# Altium schematic symbol library MY_LIB_Connectors.SchLib: 177 symbols (part 1 of 4)
Pins are listed as number, name and electrical type; pins without a type are passive.

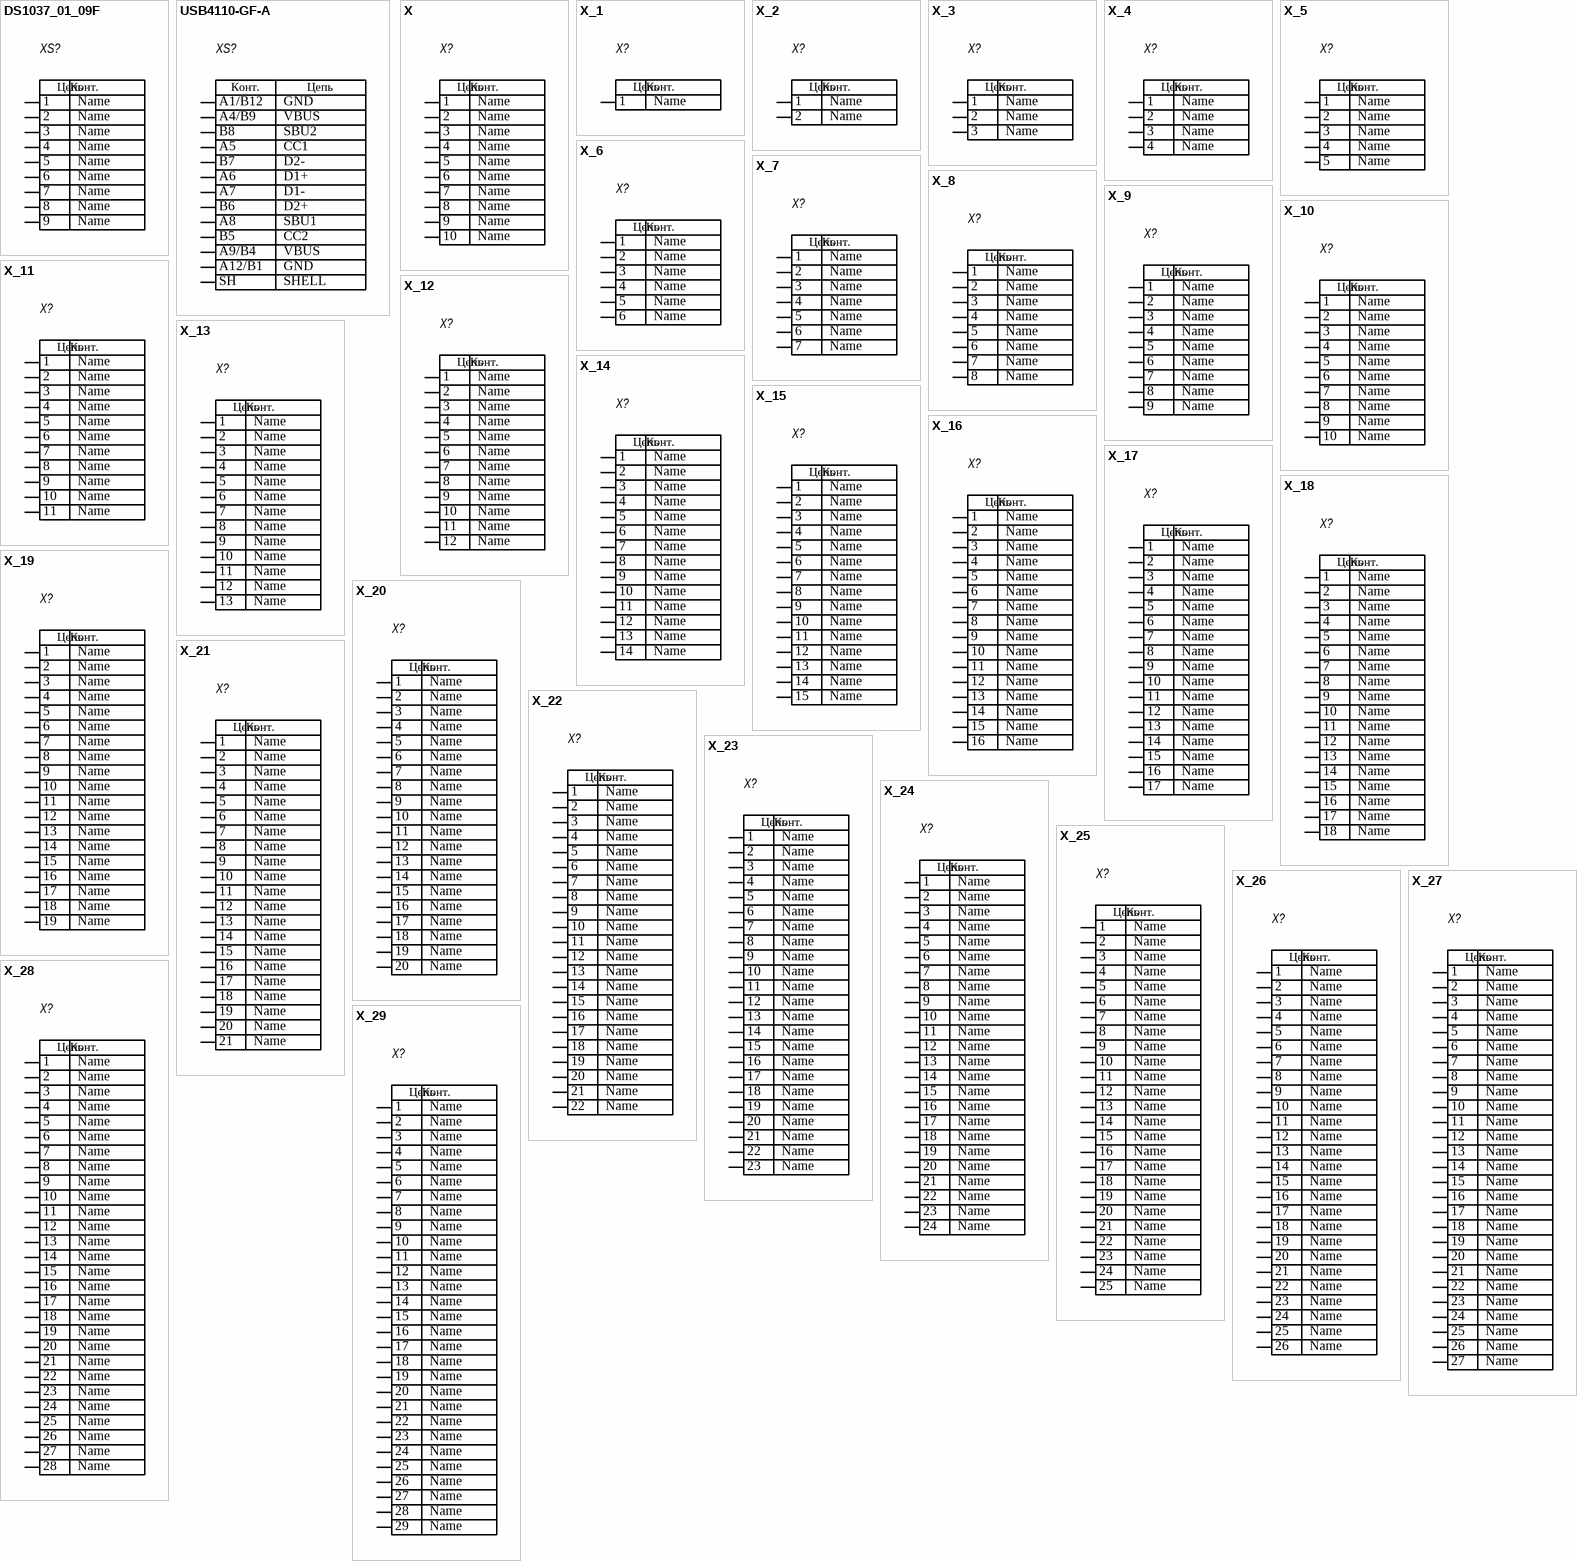
[diagram p0: symbols DS1037_01_09F to X_29]

## DS1037_01_09F
designator XS?  Pin9_Name: Name  (hidden comment: *)
Generic 9-contact connector; DBUR table style; editable signal names; Value: *; Pin8_Name: Name; Pin7_Name: Name; Pin6_Name: Name; Pin5_Name: Name; Pin4_Name: Name; Pin3_Name: Name; Pin2_Name: Name; Pin1_Name: Name
pins: 1 Name, 2 Name, 3 Name, 4 Name, 5 Name, 6 Name, 7 Name, 8 Name, 9 Name
1 alternate drawing of the same symbol
text: Конт.; Цепь

## USB4110-GF-A
designator XS?  PinA1_B12_Name: GND  PinA4_B9_Name: VBUS  PinB8_Name: SBU2  PinA5_Name: CC1  PinB7_Name: D2-  PinA6_Name: D1+  PinA7_Name: D1-  PinB6_Name: D2+  PinA8_Name: SBU1  PinB5_Name: CC2  PinSH_Name: SHELL  (hidden comment: USB4110-GF-A)
GCT USB Type-C USB2.0 receptacle; 12 PCB signal terminals representing 16 mating contacts; common SH shell pin; Value: USB4110-GF-A; Manufacturer: GCT; MPN: USB4110-GF-A; Datasheet: https://gct.co/files/drawings/usb4110.pdf; PinA9_B4_Name: VBUS; PinA12_B1_Name: GND
pins: A1/B12 GND, A4/B9 VBUS, A5 CC1, A6 D+1, A7 D-1, A8 SBU1, A9/B4 VBUS, A12/B1 GND, B5 CC2, B6 D+2, B7 D-2, B8 SBU2, SH SHELL
text: Конт.; Цепь

## X
designator X?  Pin10_Name: Name  (hidden comment: *)
Generic 10-contact connector; DBUR table style; editable signal names; Value: *; Pin9_Name: Name; Pin8_Name: Name; Pin7_Name: Name; Pin6_Name: Name; Pin5_Name: Name; Pin4_Name: Name; Pin3_Name: Name; Pin2_Name: Name; Pin1_Name: Name
pins: 1 Name, 2 Name, 3 Name, 4 Name, 5 Name, 6 Name, 7 Name, 8 Name, 9 Name, 10 Name
1 alternate drawing of the same symbol
text: Конт.; Цепь

## X_1
designator X?  Pin1_Name: Name  (hidden comment: *)
Generic 1-contact connector; DBUR table style; editable signal names; Value: *
pins: 1 Name
1 alternate drawing of the same symbol
text: Конт.; Цепь

## X_2
designator X?  Pin2_Name: Name  (hidden comment: *)
Generic 2-contact connector; DBUR table style; editable signal names; Value: *; Pin1_Name: Name
pins: 1 Name, 2 Name
1 alternate drawing of the same symbol
text: Конт.; Цепь

## X_3
designator X?  Pin3_Name: Name  (hidden comment: *)
Generic 3-contact connector; DBUR table style; editable signal names; Value: *; Pin2_Name: Name; Pin1_Name: Name
pins: 1 Name, 2 Name, 3 Name
1 alternate drawing of the same symbol
text: Конт.; Цепь

## X_4
designator X?  Pin4_Name: Name  (hidden comment: *)
Generic 4-contact connector; DBUR table style; editable signal names; Value: *; Pin3_Name: Name; Pin2_Name: Name; Pin1_Name: Name
pins: 1 Name, 2 Name, 3 Name, 4 Name
1 alternate drawing of the same symbol
text: Конт.; Цепь

## X_5
designator X?  Pin5_Name: Name  (hidden comment: *)
Generic 5-contact connector; DBUR table style; editable signal names; Value: *; Pin4_Name: Name; Pin3_Name: Name; Pin2_Name: Name; Pin1_Name: Name
pins: 1 Name, 2 Name, 3 Name, 4 Name, 5 Name
1 alternate drawing of the same symbol
text: Конт.; Цепь

## X_6
designator X?  Pin6_Name: Name  (hidden comment: *)
Generic 6-contact connector; DBUR table style; editable signal names; Value: *; Pin5_Name: Name; Pin4_Name: Name; Pin3_Name: Name; Pin2_Name: Name; Pin1_Name: Name
pins: 1 Name, 2 Name, 3 Name, 4 Name, 5 Name, 6 Name
1 alternate drawing of the same symbol
text: Конт.; Цепь

## X_7
designator X?  Pin7_Name: Name  (hidden comment: *)
Generic 7-contact connector; DBUR table style; editable signal names; Value: *; Pin6_Name: Name; Pin5_Name: Name; Pin4_Name: Name; Pin3_Name: Name; Pin2_Name: Name; Pin1_Name: Name
pins: 1 Name, 2 Name, 3 Name, 4 Name, 5 Name, 6 Name, 7 Name
1 alternate drawing of the same symbol
text: Конт.; Цепь

## X_8
designator X?  Pin8_Name: Name  (hidden comment: *)
Generic 8-contact connector; DBUR table style; editable signal names; Value: *; Pin7_Name: Name; Pin6_Name: Name; Pin5_Name: Name; Pin4_Name: Name; Pin3_Name: Name; Pin2_Name: Name; Pin1_Name: Name
pins: 1 Name, 2 Name, 3 Name, 4 Name, 5 Name, 6 Name, 7 Name, 8 Name
1 alternate drawing of the same symbol
text: Конт.; Цепь

## X_9
designator X?  Pin9_Name: Name  (hidden comment: *)
Generic 9-contact connector; DBUR table style; editable signal names; Value: *; Pin8_Name: Name; Pin7_Name: Name; Pin6_Name: Name; Pin5_Name: Name; Pin4_Name: Name; Pin3_Name: Name; Pin2_Name: Name; Pin1_Name: Name
pins: 1 Name, 2 Name, 3 Name, 4 Name, 5 Name, 6 Name, 7 Name, 8 Name, 9 Name
1 alternate drawing of the same symbol
text: Конт.; Цепь

## X_10
designator X?  Pin10_Name: Name  (hidden comment: *)
Generic 10-contact connector; DBUR table style; editable signal names; Value: *; Pin9_Name: Name; Pin8_Name: Name; Pin7_Name: Name; Pin6_Name: Name; Pin5_Name: Name; Pin4_Name: Name; Pin3_Name: Name; Pin2_Name: Name; Pin1_Name: Name
pins: 1 Name, 2 Name, 3 Name, 4 Name, 5 Name, 6 Name, 7 Name, 8 Name, 9 Name, 10 Name
1 alternate drawing of the same symbol
text: Конт.; Цепь

## X_11
designator X?  Pin11_Name: Name  (hidden comment: *)
Generic 11-contact connector; DBUR table style; editable signal names; Value: *; Pin10_Name: Name; Pin9_Name: Name; Pin8_Name: Name; Pin7_Name: Name; Pin6_Name: Name; Pin5_Name: Name; Pin4_Name: Name; Pin3_Name: Name; Pin2_Name: Name; Pin1_Name: Name
pins: 1 Name, 2 Name, 3 Name, 4 Name, 5 Name, 6 Name, 7 Name, 8 Name, 9 Name, 10 Name, 11 Name
1 alternate drawing of the same symbol
text: Конт.; Цепь

## X_12
designator X?  Pin12_Name: Name  (hidden comment: *)
Generic 12-contact connector; DBUR table style; editable signal names; Value: *; Pin11_Name: Name; Pin10_Name: Name; Pin9_Name: Name; Pin8_Name: Name; Pin7_Name: Name; Pin6_Name: Name; Pin5_Name: Name; Pin4_Name: Name; Pin3_Name: Name; Pin2_Name: Name; Pin1_Name: Name
pins: 1 Name, 2 Name, 3 Name, 4 Name, 5 Name, 6 Name, 7 Name, 8 Name, 9 Name, 10 Name, 11 Name, 12 Name
1 alternate drawing of the same symbol
text: Конт.; Цепь

## X_13
designator X?  Pin13_Name: Name  (hidden comment: *)
Generic 13-contact connector; DBUR table style; editable signal names; Value: *; Pin12_Name: Name; Pin11_Name: Name; Pin10_Name: Name; Pin9_Name: Name; Pin8_Name: Name; Pin7_Name: Name; Pin6_Name: Name; Pin5_Name: Name; Pin4_Name: Name; Pin3_Name: Name; Pin2_Name: Name; Pin1_Name: Name
pins: 1 Name, 2 Name, 3 Name, 4 Name, 5 Name, 6 Name, 7 Name, 8 Name, 9 Name, 10 Name, 11 Name, 12 Name, 13 Name
1 alternate drawing of the same symbol
text: Конт.; Цепь

## X_14
designator X?  Pin14_Name: Name  (hidden comment: *)
Generic 14-contact connector; DBUR table style; editable signal names; Value: *; Pin13_Name: Name; Pin12_Name: Name; Pin11_Name: Name; Pin10_Name: Name; Pin9_Name: Name; Pin8_Name: Name; Pin7_Name: Name; Pin6_Name: Name; Pin5_Name: Name; Pin4_Name: Name; Pin3_Name: Name; Pin2_Name: Name; Pin1_Name: Name
pins: 1 Name, 2 Name, 3 Name, 4 Name, 5 Name, 6 Name, 7 Name, 8 Name, 9 Name, 10 Name, 11 Name, 12 Name, 13 Name, 14 Name
1 alternate drawing of the same symbol
text: Конт.; Цепь

## X_15
designator X?  Pin15_Name: Name  (hidden comment: *)
Generic 15-contact connector; DBUR table style; editable signal names; Value: *; Pin14_Name: Name; Pin13_Name: Name; Pin12_Name: Name; Pin11_Name: Name; Pin10_Name: Name; Pin9_Name: Name; Pin8_Name: Name; Pin7_Name: Name; Pin6_Name: Name; Pin5_Name: Name; Pin4_Name: Name; Pin3_Name: Name; Pin2_Name: Name; Pin1_Name: Name
pins: 1 Name, 2 Name, 3 Name, 4 Name, 5 Name, 6 Name, 7 Name, 8 Name, 9 Name, 10 Name, 11 Name, 12 Name, 13 Name, 14 Name, 15 Name
1 alternate drawing of the same symbol
text: Конт.; Цепь

## X_16
designator X?  Pin16_Name: Name  (hidden comment: *)
Generic 16-contact connector; DBUR table style; editable signal names; Value: *; Pin15_Name: Name; Pin14_Name: Name; Pin13_Name: Name; Pin12_Name: Name; Pin11_Name: Name; Pin10_Name: Name; Pin9_Name: Name; Pin8_Name: Name; Pin7_Name: Name; Pin6_Name: Name; Pin5_Name: Name; Pin4_Name: Name; Pin3_Name: Name; Pin2_Name: Name; Pin1_Name: Name
pins: 1 Name, 2 Name, 3 Name, 4 Name, 5 Name, 6 Name, 7 Name, 8 Name, 9 Name, 10 Name, 11 Name, 12 Name, 13 Name, 14 Name, 15 Name, 16 Name
1 alternate drawing of the same symbol
text: Конт.; Цепь

## X_17
designator X?  Pin17_Name: Name  (hidden comment: *)
Generic 17-contact connector; DBUR table style; editable signal names; Value: *; Pin16_Name: Name; Pin15_Name: Name; Pin14_Name: Name; Pin13_Name: Name; Pin12_Name: Name; Pin11_Name: Name; Pin10_Name: Name; Pin9_Name: Name; Pin8_Name: Name; Pin7_Name: Name; Pin6_Name: Name; Pin5_Name: Name; Pin4_Name: Name; Pin3_Name: Name; Pin2_Name: Name; Pin1_Name: Name
pins: 1 Name, 2 Name, 3 Name, 4 Name, 5 Name, 6 Name, 7 Name, 8 Name, 9 Name, 10 Name, 11 Name, 12 Name, 13 Name, 14 Name, 15 Name, 16 Name, 17 Name
1 alternate drawing of the same symbol
text: Конт.; Цепь

## X_18
designator X?  Pin18_Name: Name  (hidden comment: *)
Generic 18-contact connector; DBUR table style; editable signal names; Value: *; Pin17_Name: Name; Pin16_Name: Name; Pin15_Name: Name; Pin14_Name: Name; Pin13_Name: Name; Pin12_Name: Name; Pin11_Name: Name; Pin10_Name: Name; Pin9_Name: Name; Pin8_Name: Name; Pin7_Name: Name; Pin6_Name: Name; Pin5_Name: Name; Pin4_Name: Name; Pin3_Name: Name; Pin2_Name: Name; Pin1_Name: Name
pins: 1 Name, 2 Name, 3 Name, 4 Name, 5 Name, 6 Name, 7 Name, 8 Name, 9 Name, 10 Name, 11 Name, 12 Name, 13 Name, 14 Name, 15 Name, 16 Name, 17 Name, 18 Name
1 alternate drawing of the same symbol
text: Конт.; Цепь

## X_19
designator X?  Pin19_Name: Name  (hidden comment: *)
Generic 19-contact connector; DBUR table style; editable signal names; Value: *; Pin18_Name: Name; Pin17_Name: Name; Pin16_Name: Name; Pin15_Name: Name; Pin14_Name: Name; Pin13_Name: Name; Pin12_Name: Name; Pin11_Name: Name; Pin10_Name: Name; Pin9_Name: Name; Pin8_Name: Name; Pin7_Name: Name; Pin6_Name: Name; Pin5_Name: Name; Pin4_Name: Name; Pin3_Name: Name; Pin2_Name: Name; Pin1_Name: Name
pins: 1 Name, 2 Name, 3 Name, 4 Name, 5 Name, 6 Name, 7 Name, 8 Name, 9 Name, 10 Name, 11 Name, 12 Name, 13 Name, 14 Name, 15 Name, 16 Name, 17 Name, 18 Name, 19 Name
1 alternate drawing of the same symbol
text: Конт.; Цепь

## X_20
designator X?  Pin20_Name: Name  (hidden comment: *)
Generic 20-contact connector; DBUR table style; editable signal names; Value: *; Pin19_Name: Name; Pin18_Name: Name; Pin17_Name: Name; Pin16_Name: Name; Pin15_Name: Name; Pin14_Name: Name; Pin13_Name: Name; Pin12_Name: Name; Pin11_Name: Name; Pin10_Name: Name; Pin9_Name: Name; Pin8_Name: Name; Pin7_Name: Name; Pin6_Name: Name; Pin5_Name: Name; Pin4_Name: Name; Pin3_Name: Name; Pin2_Name: Name; Pin1_Name: Name
pins: 1 Name, 2 Name, 3 Name, 4 Name, 5 Name, 6 Name, 7 Name, 8 Name, 9 Name, 10 Name, 11 Name, 12 Name, 13 Name, 14 Name, 15 Name, 16 Name, 17 Name, 18 Name, 19 Name, 20 Name
1 alternate drawing of the same symbol
text: Конт.; Цепь

## X_21
designator X?  Pin21_Name: Name  (hidden comment: *)
Generic 21-contact connector; DBUR table style; editable signal names; Value: *; Pin20_Name: Name; Pin19_Name: Name; Pin18_Name: Name; Pin17_Name: Name; Pin16_Name: Name; Pin15_Name: Name; Pin14_Name: Name; Pin13_Name: Name; Pin12_Name: Name; Pin11_Name: Name; Pin10_Name: Name; Pin9_Name: Name; Pin8_Name: Name; Pin7_Name: Name; Pin6_Name: Name; Pin5_Name: Name; Pin4_Name: Name; Pin3_Name: Name; Pin2_Name: Name; Pin1_Name: Name
pins: 1 Name, 2 Name, 3 Name, 4 Name, 5 Name, 6 Name, 7 Name, 8 Name, 9 Name, 10 Name, 11 Name, 12 Name, 13 Name, 14 Name, 15 Name, 16 Name, 17 Name, 18 Name, 19 Name, 20 Name, 21 Name
1 alternate drawing of the same symbol
text: Конт.; Цепь

## X_22
designator X?  Pin22_Name: Name  (hidden comment: *)
Generic 22-contact connector; DBUR table style; editable signal names; Value: *; Pin21_Name: Name; Pin20_Name: Name; Pin19_Name: Name; Pin18_Name: Name; Pin17_Name: Name; Pin16_Name: Name; Pin15_Name: Name; Pin14_Name: Name; Pin13_Name: Name; Pin12_Name: Name; Pin11_Name: Name; Pin10_Name: Name; Pin9_Name: Name; Pin8_Name: Name; Pin7_Name: Name; Pin6_Name: Name; Pin5_Name: Name; Pin4_Name: Name; Pin3_Name: Name; Pin2_Name: Name; Pin1_Name: Name
pins: 1 Name, 2 Name, 3 Name, 4 Name, 5 Name, 6 Name, 7 Name, 8 Name, 9 Name, 10 Name, 11 Name, 12 Name, 13 Name, 14 Name, 15 Name, 16 Name, 17 Name, 18 Name, 19 Name, 20 Name, 21 Name, 22 Name
1 alternate drawing of the same symbol
text: Конт.; Цепь

## X_23
designator X?  Pin23_Name: Name  (hidden comment: *)
Generic 23-contact connector; DBUR table style; editable signal names; Value: *; Pin22_Name: Name; Pin21_Name: Name; Pin20_Name: Name; Pin19_Name: Name; Pin18_Name: Name; Pin17_Name: Name; Pin16_Name: Name; Pin15_Name: Name; Pin14_Name: Name; Pin13_Name: Name; Pin12_Name: Name; Pin11_Name: Name; Pin10_Name: Name; Pin9_Name: Name; Pin8_Name: Name; Pin7_Name: Name; Pin6_Name: Name; Pin5_Name: Name; Pin4_Name: Name; Pin3_Name: Name; Pin2_Name: Name; Pin1_Name: Name
pins: 1 Name, 2 Name, 3 Name, 4 Name, 5 Name, 6 Name, 7 Name, 8 Name, 9 Name, 10 Name, 11 Name, 12 Name, 13 Name, 14 Name, 15 Name, 16 Name, 17 Name, 18 Name, 19 Name, 20 Name, 21 Name, 22 Name, 23 Name
1 alternate drawing of the same symbol
text: Конт.; Цепь

## X_24
designator X?  Pin24_Name: Name  (hidden comment: *)
Generic 24-contact connector; DBUR table style; editable signal names; Value: *; Pin23_Name: Name; Pin22_Name: Name; Pin21_Name: Name; Pin20_Name: Name; Pin19_Name: Name; Pin18_Name: Name; Pin17_Name: Name; Pin16_Name: Name; Pin15_Name: Name; Pin14_Name: Name; Pin13_Name: Name; Pin12_Name: Name; Pin11_Name: Name; Pin10_Name: Name; Pin9_Name: Name; Pin8_Name: Name; Pin7_Name: Name; Pin6_Name: Name; Pin5_Name: Name; Pin4_Name: Name; Pin3_Name: Name; Pin2_Name: Name; Pin1_Name: Name
pins: 1 Name, 2 Name, 3 Name, 4 Name, 5 Name, 6 Name, 7 Name, 8 Name, 9 Name, 10 Name, 11 Name, 12 Name, 13 Name, 14 Name, 15 Name, 16 Name, 17 Name, 18 Name, 19 Name, 20 Name, 21 Name, 22 Name, 23 Name, 24 Name
1 alternate drawing of the same symbol
text: Конт.; Цепь

## X_25
designator X?  Pin25_Name: Name  (hidden comment: *)
Generic 25-contact connector; DBUR table style; editable signal names; Value: *; Pin24_Name: Name; Pin23_Name: Name; Pin22_Name: Name; Pin21_Name: Name; Pin20_Name: Name; Pin19_Name: Name; Pin18_Name: Name; Pin17_Name: Name; Pin16_Name: Name; Pin15_Name: Name; Pin14_Name: Name; Pin13_Name: Name; Pin12_Name: Name; Pin11_Name: Name; Pin10_Name: Name; Pin9_Name: Name; Pin8_Name: Name; Pin7_Name: Name; Pin6_Name: Name; Pin5_Name: Name; Pin4_Name: Name; Pin3_Name: Name; Pin2_Name: Name; Pin1_Name: Name
pins: 1 Name, 2 Name, 3 Name, 4 Name, 5 Name, 6 Name, 7 Name, 8 Name, 9 Name, 10 Name, 11 Name, 12 Name, 13 Name, 14 Name, 15 Name, 16 Name, 17 Name, 18 Name, 19 Name, 20 Name, 21 Name, 22 Name, 23 Name, 24 Name, 25 Name
1 alternate drawing of the same symbol
text: Конт.; Цепь

## X_26
designator X?  Pin26_Name: Name  (hidden comment: *)
Generic 26-contact connector; DBUR table style; editable signal names; Value: *; Pin25_Name: Name; Pin24_Name: Name; Pin23_Name: Name; Pin22_Name: Name; Pin21_Name: Name; Pin20_Name: Name; Pin19_Name: Name; Pin18_Name: Name; Pin17_Name: Name; Pin16_Name: Name; Pin15_Name: Name; Pin14_Name: Name; Pin13_Name: Name; Pin12_Name: Name; Pin11_Name: Name; Pin10_Name: Name; Pin9_Name: Name; Pin8_Name: Name; Pin7_Name: Name; Pin6_Name: Name; Pin5_Name: Name; Pin4_Name: Name; Pin3_Name: Name; Pin2_Name: Name; Pin1_Name: Name
pins: 1 Name, 2 Name, 3 Name, 4 Name, 5 Name, 6 Name, 7 Name, 8 Name, 9 Name, 10 Name, 11 Name, 12 Name, 13 Name, 14 Name, 15 Name, 16 Name, 17 Name, 18 Name, 19 Name, 20 Name, 21 Name, 22 Name, 23 Name, 24 Name, 25 Name, 26 Name
1 alternate drawing of the same symbol
text: Конт.; Цепь

## X_27
designator X?  Pin27_Name: Name  (hidden comment: *)
Generic 27-contact connector; DBUR table style; editable signal names; Value: *; Pin26_Name: Name; Pin25_Name: Name; Pin24_Name: Name; Pin23_Name: Name; Pin22_Name: Name; Pin21_Name: Name; Pin20_Name: Name; Pin19_Name: Name; Pin18_Name: Name; Pin17_Name: Name; Pin16_Name: Name; Pin15_Name: Name; Pin14_Name: Name; Pin13_Name: Name; Pin12_Name: Name; Pin11_Name: Name; Pin10_Name: Name; Pin9_Name: Name; Pin8_Name: Name; Pin7_Name: Name; Pin6_Name: Name; Pin5_Name: Name; Pin4_Name: Name; Pin3_Name: Name; Pin2_Name: Name; Pin1_Name: Name
pins: 1 Name, 2 Name, 3 Name, 4 Name, 5 Name, 6 Name, 7 Name, 8 Name, 9 Name, 10 Name, 11 Name, 12 Name, 13 Name, 14 Name, 15 Name, 16 Name, 17 Name, 18 Name, 19 Name, 20 Name, 21 Name, 22 Name, 23 Name, 24 Name, 25 Name, 26 Name, 27 Name
1 alternate drawing of the same symbol
text: Конт.; Цепь

## X_28
designator X?  Pin28_Name: Name  (hidden comment: *)
Generic 28-contact connector; DBUR table style; editable signal names; Value: *; Pin27_Name: Name; Pin26_Name: Name; Pin25_Name: Name; Pin24_Name: Name; Pin23_Name: Name; Pin22_Name: Name; Pin21_Name: Name; Pin20_Name: Name; Pin19_Name: Name; Pin18_Name: Name; Pin17_Name: Name; Pin16_Name: Name; Pin15_Name: Name; Pin14_Name: Name; Pin13_Name: Name; Pin12_Name: Name; Pin11_Name: Name; Pin10_Name: Name; Pin9_Name: Name; Pin8_Name: Name; Pin7_Name: Name; Pin6_Name: Name; Pin5_Name: Name; Pin4_Name: Name; Pin3_Name: Name; Pin2_Name: Name; Pin1_Name: Name
pins: 1 Name, 2 Name, 3 Name, 4 Name, 5 Name, 6 Name, 7 Name, 8 Name, 9 Name, 10 Name, 11 Name, 12 Name, 13 Name, 14 Name, 15 Name, 16 Name, 17 Name, 18 Name, 19 Name, 20 Name, 21 Name, 22 Name, 23 Name, 24 Name, 25 Name, 26 Name, 27 Name, 28 Name
1 alternate drawing of the same symbol
text: Конт.; Цепь

## X_29
designator X?  Pin29_Name: Name  (hidden comment: *)
Generic 29-contact connector; DBUR table style; editable signal names; Value: *; Pin28_Name: Name; Pin27_Name: Name; Pin26_Name: Name; Pin25_Name: Name; Pin24_Name: Name; Pin23_Name: Name; Pin22_Name: Name; Pin21_Name: Name; Pin20_Name: Name; Pin19_Name: Name; Pin18_Name: Name; Pin17_Name: Name; Pin16_Name: Name; Pin15_Name: Name; Pin14_Name: Name; Pin13_Name: Name; Pin12_Name: Name; Pin11_Name: Name; Pin10_Name: Name; Pin9_Name: Name; Pin8_Name: Name; Pin7_Name: Name; Pin6_Name: Name; Pin5_Name: Name; Pin4_Name: Name; Pin3_Name: Name; Pin2_Name: Name; Pin1_Name: Name
pins: 1 Name, 2 Name, 3 Name, 4 Name, 5 Name, 6 Name, 7 Name, 8 Name, 9 Name, 10 Name, 11 Name, 12 Name, 13 Name, 14 Name, 15 Name, 16 Name, 17 Name, 18 Name, 19 Name, 20 Name, 21 Name, 22 Name, 23 Name, 24 Name, 25 Name, 26 Name, 27 Name, 28 Name, 29 Name
1 alternate drawing of the same symbol
text: Конт.; Цепь

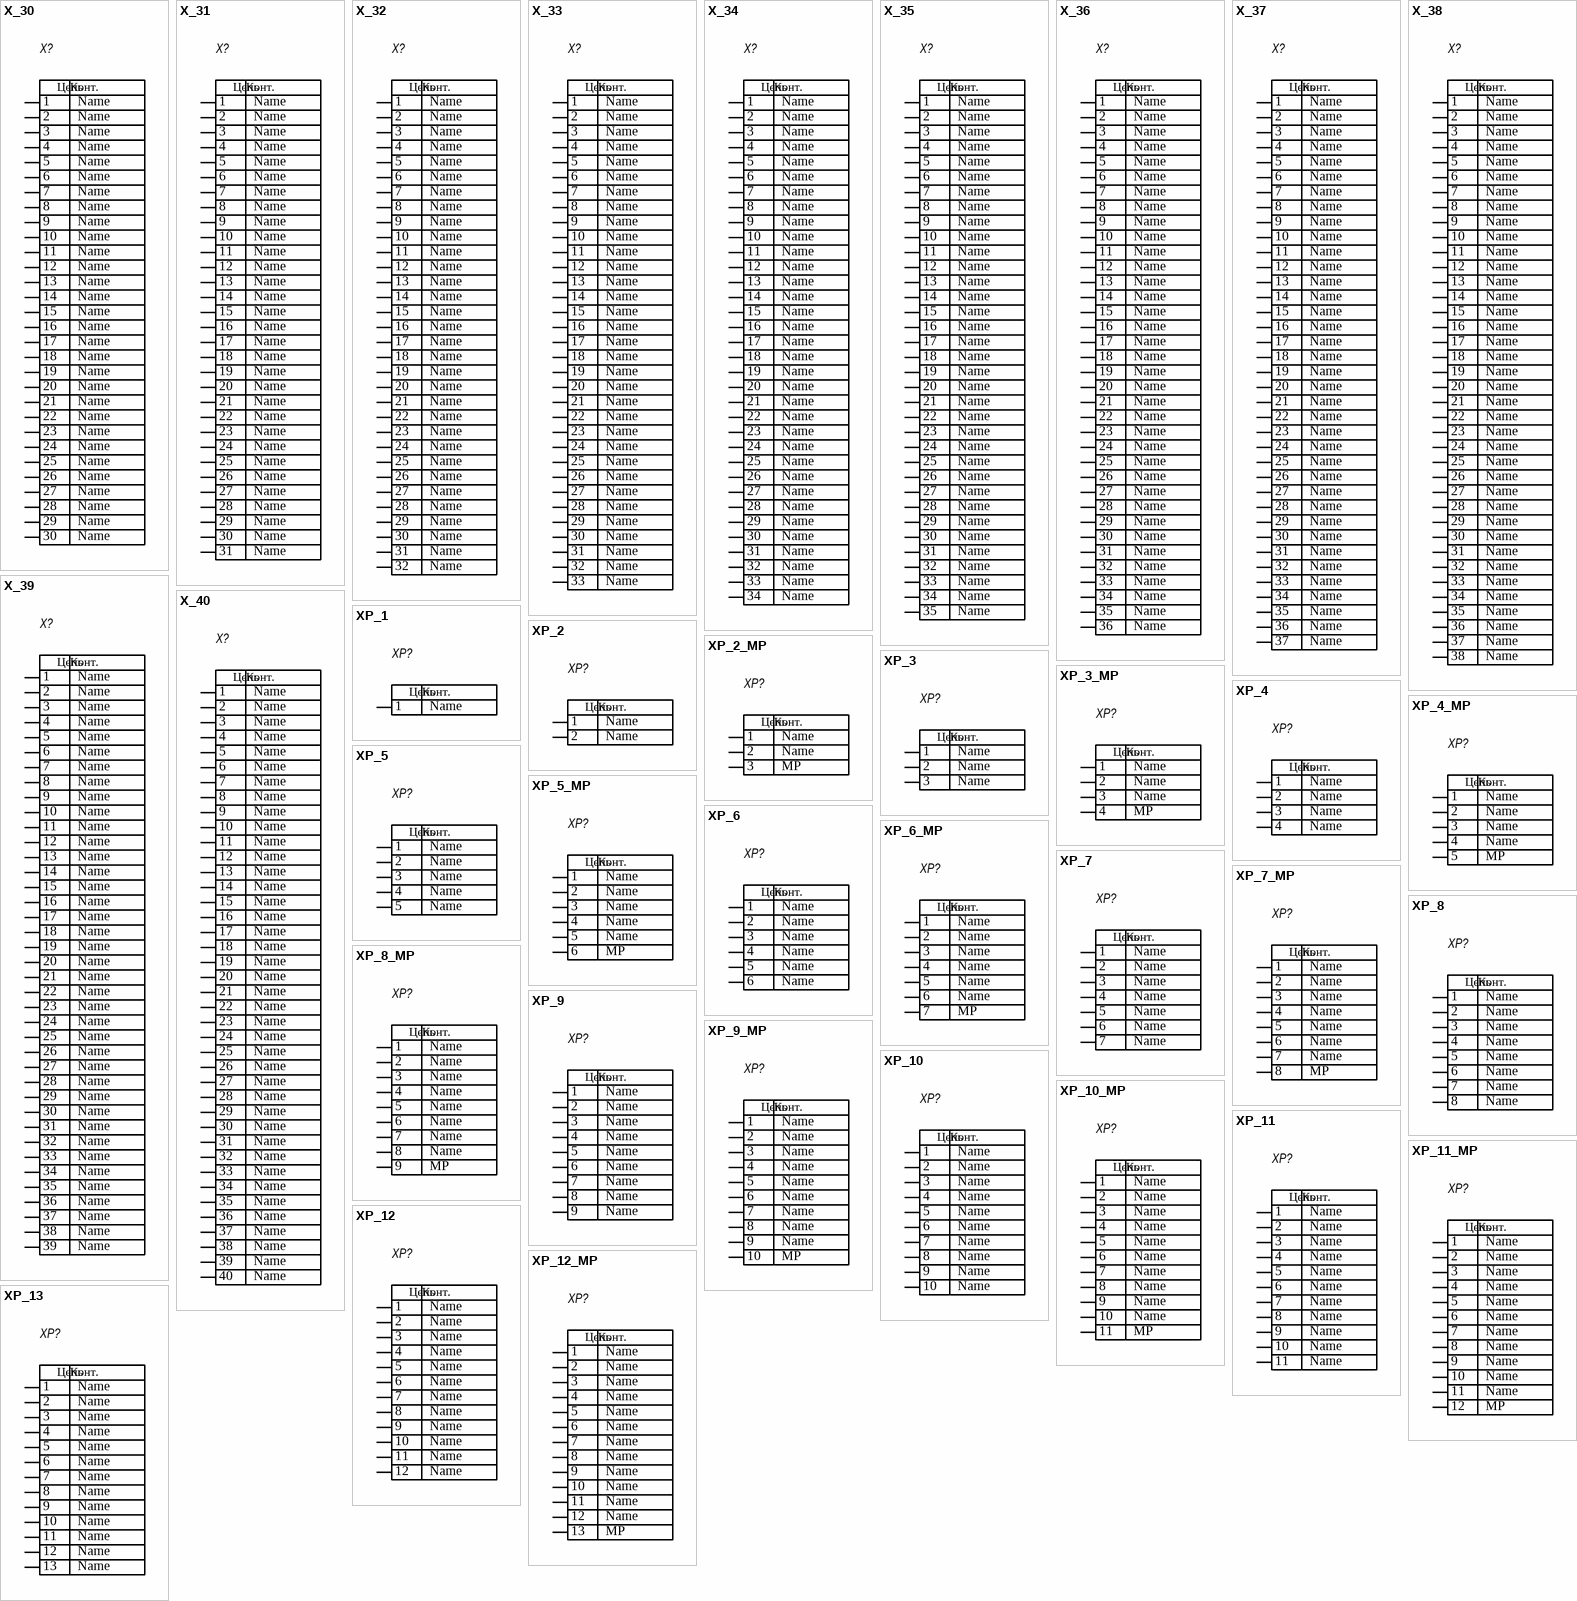
[diagram p1: symbols X_30 to XP_13]

## X_30
designator X?  Pin30_Name: Name  (hidden comment: *)
Generic 30-contact connector; DBUR table style; editable signal names; Value: *; Pin29_Name: Name; Pin28_Name: Name; Pin27_Name: Name; Pin26_Name: Name; Pin25_Name: Name; Pin24_Name: Name; Pin23_Name: Name; Pin22_Name: Name; Pin21_Name: Name; Pin20_Name: Name; Pin19_Name: Name; Pin18_Name: Name; Pin17_Name: Name; Pin16_Name: Name; Pin15_Name: Name; Pin14_Name: Name; Pin13_Name: Name; Pin12_Name: Name; Pin11_Name: Name; Pin10_Name: Name; Pin9_Name: Name; Pin8_Name: Name; Pin7_Name: Name; Pin6_Name: Name; Pin5_Name: Name; Pin4_Name: Name; Pin3_Name: Name; Pin2_Name: Name; Pin1_Name: Name
pins: 1 Name, 2 Name, 3 Name, 4 Name, 5 Name, 6 Name, 7 Name, 8 Name, 9 Name, 10 Name, 11 Name, 12 Name, 13 Name, 14 Name, 15 Name, 16 Name, 17 Name, 18 Name, 19 Name, 20 Name, 21 Name, 22 Name, 23 Name, 24 Name, 25 Name, 26 Name, 27 Name, 28 Name, 29 Name, 30 Name
1 alternate drawing of the same symbol
text: Конт.; Цепь

## X_31
designator X?  Pin31_Name: Name  (hidden comment: *)
Generic 31-contact connector; DBUR table style; editable signal names; Value: *; Pin30_Name: Name; Pin29_Name: Name; Pin28_Name: Name; Pin27_Name: Name; Pin26_Name: Name; Pin25_Name: Name; Pin24_Name: Name; Pin23_Name: Name; Pin22_Name: Name; Pin21_Name: Name; Pin20_Name: Name; Pin19_Name: Name; Pin18_Name: Name; Pin17_Name: Name; Pin16_Name: Name; Pin15_Name: Name; Pin14_Name: Name; Pin13_Name: Name; Pin12_Name: Name; Pin11_Name: Name; Pin10_Name: Name; Pin9_Name: Name; Pin8_Name: Name; Pin7_Name: Name; Pin6_Name: Name; Pin5_Name: Name; Pin4_Name: Name; Pin3_Name: Name; Pin2_Name: Name; Pin1_Name: Name
pins: 1 Name, 2 Name, 3 Name, 4 Name, 5 Name, 6 Name, 7 Name, 8 Name, 9 Name, 10 Name, 11 Name, 12 Name, 13 Name, 14 Name, 15 Name, 16 Name, 17 Name, 18 Name, 19 Name, 20 Name, 21 Name, 22 Name, 23 Name, 24 Name, 25 Name, 26 Name, 27 Name, 28 Name, 29 Name, 30 Name, 31 Name
1 alternate drawing of the same symbol
text: Конт.; Цепь

## X_32
designator X?  Pin32_Name: Name  (hidden comment: *)
Generic 32-contact connector; DBUR table style; editable signal names; Value: *; Pin31_Name: Name; Pin30_Name: Name; Pin29_Name: Name; Pin28_Name: Name; Pin27_Name: Name; Pin26_Name: Name; Pin25_Name: Name; Pin24_Name: Name; Pin23_Name: Name; Pin22_Name: Name; Pin21_Name: Name; Pin20_Name: Name; Pin19_Name: Name; Pin18_Name: Name; Pin17_Name: Name; Pin16_Name: Name; Pin15_Name: Name; Pin14_Name: Name; Pin13_Name: Name; Pin12_Name: Name; Pin11_Name: Name; Pin10_Name: Name; Pin9_Name: Name; Pin8_Name: Name; Pin7_Name: Name; Pin6_Name: Name; Pin5_Name: Name; Pin4_Name: Name; Pin3_Name: Name; Pin2_Name: Name; Pin1_Name: Name
pins: 1 Name, 2 Name, 3 Name, 4 Name, 5 Name, 6 Name, 7 Name, 8 Name, 9 Name, 10 Name, 11 Name, 12 Name, 13 Name, 14 Name, 15 Name, 16 Name, 17 Name, 18 Name, 19 Name, 20 Name, 21 Name, 22 Name, 23 Name, 24 Name, 25 Name, 26 Name, 27 Name, 28 Name, 29 Name, 30 Name, 31 Name, 32 Name
1 alternate drawing of the same symbol
text: Конт.; Цепь

## X_33
designator X?  Pin33_Name: Name  (hidden comment: *)
Generic 33-contact connector; DBUR table style; editable signal names; Value: *; Pin32_Name: Name; Pin31_Name: Name; Pin30_Name: Name; Pin29_Name: Name; Pin28_Name: Name; Pin27_Name: Name; Pin26_Name: Name; Pin25_Name: Name; Pin24_Name: Name; Pin23_Name: Name; Pin22_Name: Name; Pin21_Name: Name; Pin20_Name: Name; Pin19_Name: Name; Pin18_Name: Name; Pin17_Name: Name; Pin16_Name: Name; Pin15_Name: Name; Pin14_Name: Name; Pin13_Name: Name; Pin12_Name: Name; Pin11_Name: Name; Pin10_Name: Name; Pin9_Name: Name; Pin8_Name: Name; Pin7_Name: Name; Pin6_Name: Name; Pin5_Name: Name; Pin4_Name: Name; Pin3_Name: Name; Pin2_Name: Name; Pin1_Name: Name
pins: 1 Name, 2 Name, 3 Name, 4 Name, 5 Name, 6 Name, 7 Name, 8 Name, 9 Name, 10 Name, 11 Name, 12 Name, 13 Name, 14 Name, 15 Name, 16 Name, 17 Name, 18 Name, 19 Name, 20 Name, 21 Name, 22 Name, 23 Name, 24 Name, 25 Name, 26 Name, 27 Name, 28 Name, 29 Name, 30 Name, 31 Name, 32 Name, 33 Name
1 alternate drawing of the same symbol
text: Конт.; Цепь

## X_34
designator X?  Pin34_Name: Name  (hidden comment: *)
Generic 34-contact connector; DBUR table style; editable signal names; Value: *; Pin33_Name: Name; Pin32_Name: Name; Pin31_Name: Name; Pin30_Name: Name; Pin29_Name: Name; Pin28_Name: Name; Pin27_Name: Name; Pin26_Name: Name; Pin25_Name: Name; Pin24_Name: Name; Pin23_Name: Name; Pin22_Name: Name; Pin21_Name: Name; Pin20_Name: Name; Pin19_Name: Name; Pin18_Name: Name; Pin17_Name: Name; Pin16_Name: Name; Pin15_Name: Name; Pin14_Name: Name; Pin13_Name: Name; Pin12_Name: Name; Pin11_Name: Name; Pin10_Name: Name; Pin9_Name: Name; Pin8_Name: Name; Pin7_Name: Name; Pin6_Name: Name; Pin5_Name: Name; Pin4_Name: Name; Pin3_Name: Name; Pin2_Name: Name; Pin1_Name: Name
pins: 1 Name, 2 Name, 3 Name, 4 Name, 5 Name, 6 Name, 7 Name, 8 Name, 9 Name, 10 Name, 11 Name, 12 Name, 13 Name, 14 Name, 15 Name, 16 Name, 17 Name, 18 Name, 19 Name, 20 Name, 21 Name, 22 Name, 23 Name, 24 Name, 25 Name, 26 Name, 27 Name, 28 Name, 29 Name, 30 Name, 31 Name, 32 Name, 33 Name, 34 Name
1 alternate drawing of the same symbol
text: Конт.; Цепь

## X_35
designator X?  Pin35_Name: Name  (hidden comment: *)
Generic 35-contact connector; DBUR table style; editable signal names; Value: *; Pin34_Name: Name; Pin33_Name: Name; Pin32_Name: Name; Pin31_Name: Name; Pin30_Name: Name; Pin29_Name: Name; Pin28_Name: Name; Pin27_Name: Name; Pin26_Name: Name; Pin25_Name: Name; Pin24_Name: Name; Pin23_Name: Name; Pin22_Name: Name; Pin21_Name: Name; Pin20_Name: Name; Pin19_Name: Name; Pin18_Name: Name; Pin17_Name: Name; Pin16_Name: Name; Pin15_Name: Name; Pin14_Name: Name; Pin13_Name: Name; Pin12_Name: Name; Pin11_Name: Name; Pin10_Name: Name; Pin9_Name: Name; Pin8_Name: Name; Pin7_Name: Name; Pin6_Name: Name; Pin5_Name: Name; Pin4_Name: Name; Pin3_Name: Name; Pin2_Name: Name; Pin1_Name: Name
pins: 1 Name, 2 Name, 3 Name, 4 Name, 5 Name, 6 Name, 7 Name, 8 Name, 9 Name, 10 Name, 11 Name, 12 Name, 13 Name, 14 Name, 15 Name, 16 Name, 17 Name, 18 Name, 19 Name, 20 Name, 21 Name, 22 Name, 23 Name, 24 Name, 25 Name, 26 Name, 27 Name, 28 Name, 29 Name, 30 Name, 31 Name, 32 Name, 33 Name, 34 Name, 35 Name
1 alternate drawing of the same symbol
text: Конт.; Цепь

## X_36
designator X?  Pin36_Name: Name  (hidden comment: *)
Generic 36-contact connector; DBUR table style; editable signal names; Value: *; Pin35_Name: Name; Pin34_Name: Name; Pin33_Name: Name; Pin32_Name: Name; Pin31_Name: Name; Pin30_Name: Name; Pin29_Name: Name; Pin28_Name: Name; Pin27_Name: Name; Pin26_Name: Name; Pin25_Name: Name; Pin24_Name: Name; Pin23_Name: Name; Pin22_Name: Name; Pin21_Name: Name; Pin20_Name: Name; Pin19_Name: Name; Pin18_Name: Name; Pin17_Name: Name; Pin16_Name: Name; Pin15_Name: Name; Pin14_Name: Name; Pin13_Name: Name; Pin12_Name: Name; Pin11_Name: Name; Pin10_Name: Name; Pin9_Name: Name; Pin8_Name: Name; Pin7_Name: Name; Pin6_Name: Name; Pin5_Name: Name; Pin4_Name: Name; Pin3_Name: Name; Pin2_Name: Name; Pin1_Name: Name
pins: 1 Name, 2 Name, 3 Name, 4 Name, 5 Name, 6 Name, 7 Name, 8 Name, 9 Name, 10 Name, 11 Name, 12 Name, 13 Name, 14 Name, 15 Name, 16 Name, 17 Name, 18 Name, 19 Name, 20 Name, 21 Name, 22 Name, 23 Name, 24 Name, 25 Name, 26 Name, 27 Name, 28 Name, 29 Name, 30 Name, 31 Name, 32 Name, 33 Name, 34 Name, 35 Name, 36 Name
1 alternate drawing of the same symbol
text: Конт.; Цепь

## X_37
designator X?  Pin37_Name: Name  (hidden comment: *)
Generic 37-contact connector; DBUR table style; editable signal names; Value: *; Pin36_Name: Name; Pin35_Name: Name; Pin34_Name: Name; Pin33_Name: Name; Pin32_Name: Name; Pin31_Name: Name; Pin30_Name: Name; Pin29_Name: Name; Pin28_Name: Name; Pin27_Name: Name; Pin26_Name: Name; Pin25_Name: Name; Pin24_Name: Name; Pin23_Name: Name; Pin22_Name: Name; Pin21_Name: Name; Pin20_Name: Name; Pin19_Name: Name; Pin18_Name: Name; Pin17_Name: Name; Pin16_Name: Name; Pin15_Name: Name; Pin14_Name: Name; Pin13_Name: Name; Pin12_Name: Name; Pin11_Name: Name; Pin10_Name: Name; Pin9_Name: Name; Pin8_Name: Name; Pin7_Name: Name; Pin6_Name: Name; Pin5_Name: Name; Pin4_Name: Name; Pin3_Name: Name; Pin2_Name: Name; Pin1_Name: Name
pins: 1 Name, 2 Name, 3 Name, 4 Name, 5 Name, 6 Name, 7 Name, 8 Name, 9 Name, 10 Name, 11 Name, 12 Name, 13 Name, 14 Name, 15 Name, 16 Name, 17 Name, 18 Name, 19 Name, 20 Name, 21 Name, 22 Name, 23 Name, 24 Name, 25 Name, 26 Name, 27 Name, 28 Name, 29 Name, 30 Name, 31 Name, 32 Name, 33 Name, 34 Name, 35 Name, 36 Name, 37 Name
1 alternate drawing of the same symbol
text: Конт.; Цепь

## X_38
designator X?  Pin38_Name: Name  (hidden comment: *)
Generic 38-contact connector; DBUR table style; editable signal names; Value: *; Pin37_Name: Name; Pin36_Name: Name; Pin35_Name: Name; Pin34_Name: Name; Pin33_Name: Name; Pin32_Name: Name; Pin31_Name: Name; Pin30_Name: Name; Pin29_Name: Name; Pin28_Name: Name; Pin27_Name: Name; Pin26_Name: Name; Pin25_Name: Name; Pin24_Name: Name; Pin23_Name: Name; Pin22_Name: Name; Pin21_Name: Name; Pin20_Name: Name; Pin19_Name: Name; Pin18_Name: Name; Pin17_Name: Name; Pin16_Name: Name; Pin15_Name: Name; Pin14_Name: Name; Pin13_Name: Name; Pin12_Name: Name; Pin11_Name: Name; Pin10_Name: Name; Pin9_Name: Name; Pin8_Name: Name; Pin7_Name: Name; Pin6_Name: Name; Pin5_Name: Name; Pin4_Name: Name; Pin3_Name: Name; Pin2_Name: Name; Pin1_Name: Name
pins: 1 Name, 2 Name, 3 Name, 4 Name, 5 Name, 6 Name, 7 Name, 8 Name, 9 Name, 10 Name, 11 Name, 12 Name, 13 Name, 14 Name, 15 Name, 16 Name, 17 Name, 18 Name, 19 Name, 20 Name, 21 Name, 22 Name, 23 Name, 24 Name, 25 Name, 26 Name, 27 Name, 28 Name, 29 Name, 30 Name, 31 Name, 32 Name, 33 Name, 34 Name, 35 Name, 36 Name, 37 Name, 38 Name
1 alternate drawing of the same symbol
text: Конт.; Цепь

## X_39
designator X?  Pin39_Name: Name  (hidden comment: *)
Generic 39-contact connector; DBUR table style; editable signal names; Value: *; Pin38_Name: Name; Pin37_Name: Name; Pin36_Name: Name; Pin35_Name: Name; Pin34_Name: Name; Pin33_Name: Name; Pin32_Name: Name; Pin31_Name: Name; Pin30_Name: Name; Pin29_Name: Name; Pin28_Name: Name; Pin27_Name: Name; Pin26_Name: Name; Pin25_Name: Name; Pin24_Name: Name; Pin23_Name: Name; Pin22_Name: Name; Pin21_Name: Name; Pin20_Name: Name; Pin19_Name: Name; Pin18_Name: Name; Pin17_Name: Name; Pin16_Name: Name; Pin15_Name: Name; Pin14_Name: Name; Pin13_Name: Name; Pin12_Name: Name; Pin11_Name: Name; Pin10_Name: Name; Pin9_Name: Name; Pin8_Name: Name; Pin7_Name: Name; Pin6_Name: Name; Pin5_Name: Name; Pin4_Name: Name; Pin3_Name: Name; Pin2_Name: Name; Pin1_Name: Name
pins: 1 Name, 2 Name, 3 Name, 4 Name, 5 Name, 6 Name, 7 Name, 8 Name, 9 Name, 10 Name, 11 Name, 12 Name, 13 Name, 14 Name, 15 Name, 16 Name, 17 Name, 18 Name, 19 Name, 20 Name, 21 Name, 22 Name, 23 Name, 24 Name, 25 Name, 26 Name, 27 Name, 28 Name, 29 Name, 30 Name, 31 Name, 32 Name, 33 Name, 34 Name, 35 Name, 36 Name, 37 Name, 38 Name, 39 Name
1 alternate drawing of the same symbol
text: Конт.; Цепь

## X_40
designator X?  Pin40_Name: Name  (hidden comment: *)
Generic 40-contact connector; DBUR table style; editable signal names; Value: *; Pin39_Name: Name; Pin38_Name: Name; Pin37_Name: Name; Pin36_Name: Name; Pin35_Name: Name; Pin34_Name: Name; Pin33_Name: Name; Pin32_Name: Name; Pin31_Name: Name; Pin30_Name: Name; Pin29_Name: Name; Pin28_Name: Name; Pin27_Name: Name; Pin26_Name: Name; Pin25_Name: Name; Pin24_Name: Name; Pin23_Name: Name; Pin22_Name: Name; Pin21_Name: Name; Pin20_Name: Name; Pin19_Name: Name; Pin18_Name: Name; Pin17_Name: Name; Pin16_Name: Name; Pin15_Name: Name; Pin14_Name: Name; Pin13_Name: Name; Pin12_Name: Name; Pin11_Name: Name; Pin10_Name: Name; Pin9_Name: Name; Pin8_Name: Name; Pin7_Name: Name; Pin6_Name: Name; Pin5_Name: Name; Pin4_Name: Name; Pin3_Name: Name; Pin2_Name: Name; Pin1_Name: Name
pins: 1 Name, 2 Name, 3 Name, 4 Name, 5 Name, 6 Name, 7 Name, 8 Name, 9 Name, 10 Name, 11 Name, 12 Name, 13 Name, 14 Name, 15 Name, 16 Name, 17 Name, 18 Name, 19 Name, 20 Name, 21 Name, 22 Name, 23 Name, 24 Name, 25 Name, 26 Name, 27 Name, 28 Name, 29 Name, 30 Name, 31 Name, 32 Name, 33 Name, 34 Name, 35 Name, 36 Name, 37 Name, 38 Name, 39 Name, 40 Name
1 alternate drawing of the same symbol
text: Конт.; Цепь

## XP_1
designator XP?  Pin1_Name: Name  (hidden comment: *)
Generic 1-contact connector; DBUR table style; editable signal names; Value: *
pins: 1 Name
1 alternate drawing of the same symbol
text: Конт.; Цепь

## XP_2
designator XP?  Pin2_Name: Name  (hidden comment: *)
Generic 2-contact connector; DBUR table style; editable signal names; Value: *; Pin1_Name: Name
pins: 1 Name, 2 Name
1 alternate drawing of the same symbol
text: Конт.; Цепь

## XP_2_MP
designator XP?  Pin3_Name: MP  Pin2_Name: Name  (hidden comment: *)
2 signal contacts plus MP; plug connector; Value: *; Pin1_Name: Name
pins: 1 Name, 2 Name, 3 MP
1 alternate drawing of the same symbol
text: Конт.; Цепь

## XP_3
designator XP?  Pin3_Name: Name  (hidden comment: *)
Generic 3-contact connector; DBUR table style; editable signal names; Value: *; Pin2_Name: Name; Pin1_Name: Name
pins: 1 Name, 2 Name, 3 Name
1 alternate drawing of the same symbol
text: Конт.; Цепь

## XP_3_MP
designator XP?  Pin4_Name: MP  Pin3_Name: Name  (hidden comment: *)
3 signal contacts plus MP; plug connector; Value: *; Pin2_Name: Name; Pin1_Name: Name
pins: 1 Name, 2 Name, 3 Name, 4 MP
1 alternate drawing of the same symbol
text: Конт.; Цепь

## XP_4
designator XP?  Pin4_Name: Name  (hidden comment: *)
Generic 4-contact connector; DBUR table style; editable signal names; Value: *; Pin3_Name: Name; Pin2_Name: Name; Pin1_Name: Name
pins: 1 Name, 2 Name, 3 Name, 4 Name
1 alternate drawing of the same symbol
text: Конт.; Цепь

## XP_4_MP
designator XP?  Pin5_Name: MP  Pin4_Name: Name  (hidden comment: *)
4 signal contacts plus MP; plug connector; Value: *; Pin3_Name: Name; Pin2_Name: Name; Pin1_Name: Name
pins: 1 Name, 2 Name, 3 Name, 4 Name, 5 MP
1 alternate drawing of the same symbol
text: Конт.; Цепь

## XP_5
designator XP?  Pin5_Name: Name  (hidden comment: *)
Generic 5-contact connector; DBUR table style; editable signal names; Value: *; Pin4_Name: Name; Pin3_Name: Name; Pin2_Name: Name; Pin1_Name: Name
pins: 1 Name, 2 Name, 3 Name, 4 Name, 5 Name
1 alternate drawing of the same symbol
text: Конт.; Цепь

## XP_5_MP
designator XP?  Pin6_Name: MP  Pin5_Name: Name  (hidden comment: *)
5 signal contacts plus MP; plug connector; Value: *; Pin4_Name: Name; Pin3_Name: Name; Pin2_Name: Name; Pin1_Name: Name
pins: 1 Name, 2 Name, 3 Name, 4 Name, 5 Name, 6 MP
1 alternate drawing of the same symbol
text: Конт.; Цепь

## XP_6
designator XP?  Pin6_Name: Name  (hidden comment: *)
Generic 6-contact connector; DBUR table style; editable signal names; Value: *; Pin5_Name: Name; Pin4_Name: Name; Pin3_Name: Name; Pin2_Name: Name; Pin1_Name: Name
pins: 1 Name, 2 Name, 3 Name, 4 Name, 5 Name, 6 Name
1 alternate drawing of the same symbol
text: Конт.; Цепь

## XP_6_MP
designator XP?  Pin7_Name: MP  Pin6_Name: Name  (hidden comment: *)
6 signal contacts plus MP; plug connector; Value: *; Pin5_Name: Name; Pin4_Name: Name; Pin3_Name: Name; Pin2_Name: Name; Pin1_Name: Name
pins: 1 Name, 2 Name, 3 Name, 4 Name, 5 Name, 6 Name, 7 MP
1 alternate drawing of the same symbol
text: Конт.; Цепь

## XP_7
designator XP?  Pin7_Name: Name  (hidden comment: *)
Generic 7-contact connector; DBUR table style; editable signal names; Value: *; Pin6_Name: Name; Pin5_Name: Name; Pin4_Name: Name; Pin3_Name: Name; Pin2_Name: Name; Pin1_Name: Name
pins: 1 Name, 2 Name, 3 Name, 4 Name, 5 Name, 6 Name, 7 Name
1 alternate drawing of the same symbol
text: Конт.; Цепь

## XP_7_MP
designator XP?  Pin8_Name: MP  Pin7_Name: Name  (hidden comment: *)
7 signal contacts plus MP; plug connector; Value: *; Pin6_Name: Name; Pin5_Name: Name; Pin4_Name: Name; Pin3_Name: Name; Pin2_Name: Name; Pin1_Name: Name
pins: 1 Name, 2 Name, 3 Name, 4 Name, 5 Name, 6 Name, 7 Name, 8 MP
1 alternate drawing of the same symbol
text: Конт.; Цепь

## XP_8
designator XP?  Pin8_Name: Name  (hidden comment: *)
Generic 8-contact connector; DBUR table style; editable signal names; Value: *; Pin7_Name: Name; Pin6_Name: Name; Pin5_Name: Name; Pin4_Name: Name; Pin3_Name: Name; Pin2_Name: Name; Pin1_Name: Name
pins: 1 Name, 2 Name, 3 Name, 4 Name, 5 Name, 6 Name, 7 Name, 8 Name
1 alternate drawing of the same symbol
text: Конт.; Цепь

## XP_8_MP
designator XP?  Pin9_Name: MP  Pin8_Name: Name  (hidden comment: *)
8 signal contacts plus MP; plug connector; Value: *; Pin7_Name: Name; Pin6_Name: Name; Pin5_Name: Name; Pin4_Name: Name; Pin3_Name: Name; Pin2_Name: Name; Pin1_Name: Name
pins: 1 Name, 2 Name, 3 Name, 4 Name, 5 Name, 6 Name, 7 Name, 8 Name, 9 MP
1 alternate drawing of the same symbol
text: Конт.; Цепь

## XP_9
designator XP?  Pin9_Name: Name  (hidden comment: *)
Generic 9-contact connector; DBUR table style; editable signal names; Value: *; Pin8_Name: Name; Pin7_Name: Name; Pin6_Name: Name; Pin5_Name: Name; Pin4_Name: Name; Pin3_Name: Name; Pin2_Name: Name; Pin1_Name: Name
pins: 1 Name, 2 Name, 3 Name, 4 Name, 5 Name, 6 Name, 7 Name, 8 Name, 9 Name
1 alternate drawing of the same symbol
text: Конт.; Цепь

## XP_9_MP
designator XP?  Pin10_Name: MP  Pin9_Name: Name  (hidden comment: *)
9 signal contacts plus MP; plug connector; Value: *; Pin8_Name: Name; Pin7_Name: Name; Pin6_Name: Name; Pin5_Name: Name; Pin4_Name: Name; Pin3_Name: Name; Pin2_Name: Name; Pin1_Name: Name
pins: 1 Name, 2 Name, 3 Name, 4 Name, 5 Name, 6 Name, 7 Name, 8 Name, 9 Name, 10 MP
1 alternate drawing of the same symbol
text: Конт.; Цепь

## XP_10
designator XP?  Pin10_Name: Name  (hidden comment: *)
Generic 10-contact connector; DBUR table style; editable signal names; Value: *; Pin9_Name: Name; Pin8_Name: Name; Pin7_Name: Name; Pin6_Name: Name; Pin5_Name: Name; Pin4_Name: Name; Pin3_Name: Name; Pin2_Name: Name; Pin1_Name: Name
pins: 1 Name, 2 Name, 3 Name, 4 Name, 5 Name, 6 Name, 7 Name, 8 Name, 9 Name, 10 Name
1 alternate drawing of the same symbol
text: Конт.; Цепь

## XP_10_MP
designator XP?  Pin11_Name: MP  Pin10_Name: Name  (hidden comment: *)
10 signal contacts plus MP; plug connector; Value: *; Pin9_Name: Name; Pin8_Name: Name; Pin7_Name: Name; Pin6_Name: Name; Pin5_Name: Name; Pin4_Name: Name; Pin3_Name: Name; Pin2_Name: Name; Pin1_Name: Name
pins: 1 Name, 2 Name, 3 Name, 4 Name, 5 Name, 6 Name, 7 Name, 8 Name, 9 Name, 10 Name, 11 MP
1 alternate drawing of the same symbol
text: Конт.; Цепь

## XP_11
designator XP?  Pin11_Name: Name  (hidden comment: *)
Generic 11-contact connector; DBUR table style; editable signal names; Value: *; Pin10_Name: Name; Pin9_Name: Name; Pin8_Name: Name; Pin7_Name: Name; Pin6_Name: Name; Pin5_Name: Name; Pin4_Name: Name; Pin3_Name: Name; Pin2_Name: Name; Pin1_Name: Name
pins: 1 Name, 2 Name, 3 Name, 4 Name, 5 Name, 6 Name, 7 Name, 8 Name, 9 Name, 10 Name, 11 Name
1 alternate drawing of the same symbol
text: Конт.; Цепь

## XP_11_MP
designator XP?  Pin12_Name: MP  Pin11_Name: Name  (hidden comment: *)
11 signal contacts plus MP; plug connector; Value: *; Pin10_Name: Name; Pin9_Name: Name; Pin8_Name: Name; Pin7_Name: Name; Pin6_Name: Name; Pin5_Name: Name; Pin4_Name: Name; Pin3_Name: Name; Pin2_Name: Name; Pin1_Name: Name
pins: 1 Name, 2 Name, 3 Name, 4 Name, 5 Name, 6 Name, 7 Name, 8 Name, 9 Name, 10 Name, 11 Name, 12 MP
1 alternate drawing of the same symbol
text: Конт.; Цепь

## XP_12
designator XP?  Pin12_Name: Name  (hidden comment: *)
Generic 12-contact connector; DBUR table style; editable signal names; Value: *; Pin11_Name: Name; Pin10_Name: Name; Pin9_Name: Name; Pin8_Name: Name; Pin7_Name: Name; Pin6_Name: Name; Pin5_Name: Name; Pin4_Name: Name; Pin3_Name: Name; Pin2_Name: Name; Pin1_Name: Name
pins: 1 Name, 2 Name, 3 Name, 4 Name, 5 Name, 6 Name, 7 Name, 8 Name, 9 Name, 10 Name, 11 Name, 12 Name
1 alternate drawing of the same symbol
text: Конт.; Цепь

## XP_12_MP
designator XP?  Pin13_Name: MP  Pin12_Name: Name  (hidden comment: *)
12 signal contacts plus MP; plug connector; Value: *; Pin11_Name: Name; Pin10_Name: Name; Pin9_Name: Name; Pin8_Name: Name; Pin7_Name: Name; Pin6_Name: Name; Pin5_Name: Name; Pin4_Name: Name; Pin3_Name: Name; Pin2_Name: Name; Pin1_Name: Name
pins: 1 Name, 2 Name, 3 Name, 4 Name, 5 Name, 6 Name, 7 Name, 8 Name, 9 Name, 10 Name, 11 Name, 12 Name, 13 MP
1 alternate drawing of the same symbol
text: Конт.; Цепь

## XP_13
designator XP?  Pin13_Name: Name  (hidden comment: *)
Generic 13-contact connector; DBUR table style; editable signal names; Value: *; Pin12_Name: Name; Pin11_Name: Name; Pin10_Name: Name; Pin9_Name: Name; Pin8_Name: Name; Pin7_Name: Name; Pin6_Name: Name; Pin5_Name: Name; Pin4_Name: Name; Pin3_Name: Name; Pin2_Name: Name; Pin1_Name: Name
pins: 1 Name, 2 Name, 3 Name, 4 Name, 5 Name, 6 Name, 7 Name, 8 Name, 9 Name, 10 Name, 11 Name, 12 Name, 13 Name
1 alternate drawing of the same symbol
text: Конт.; Цепь

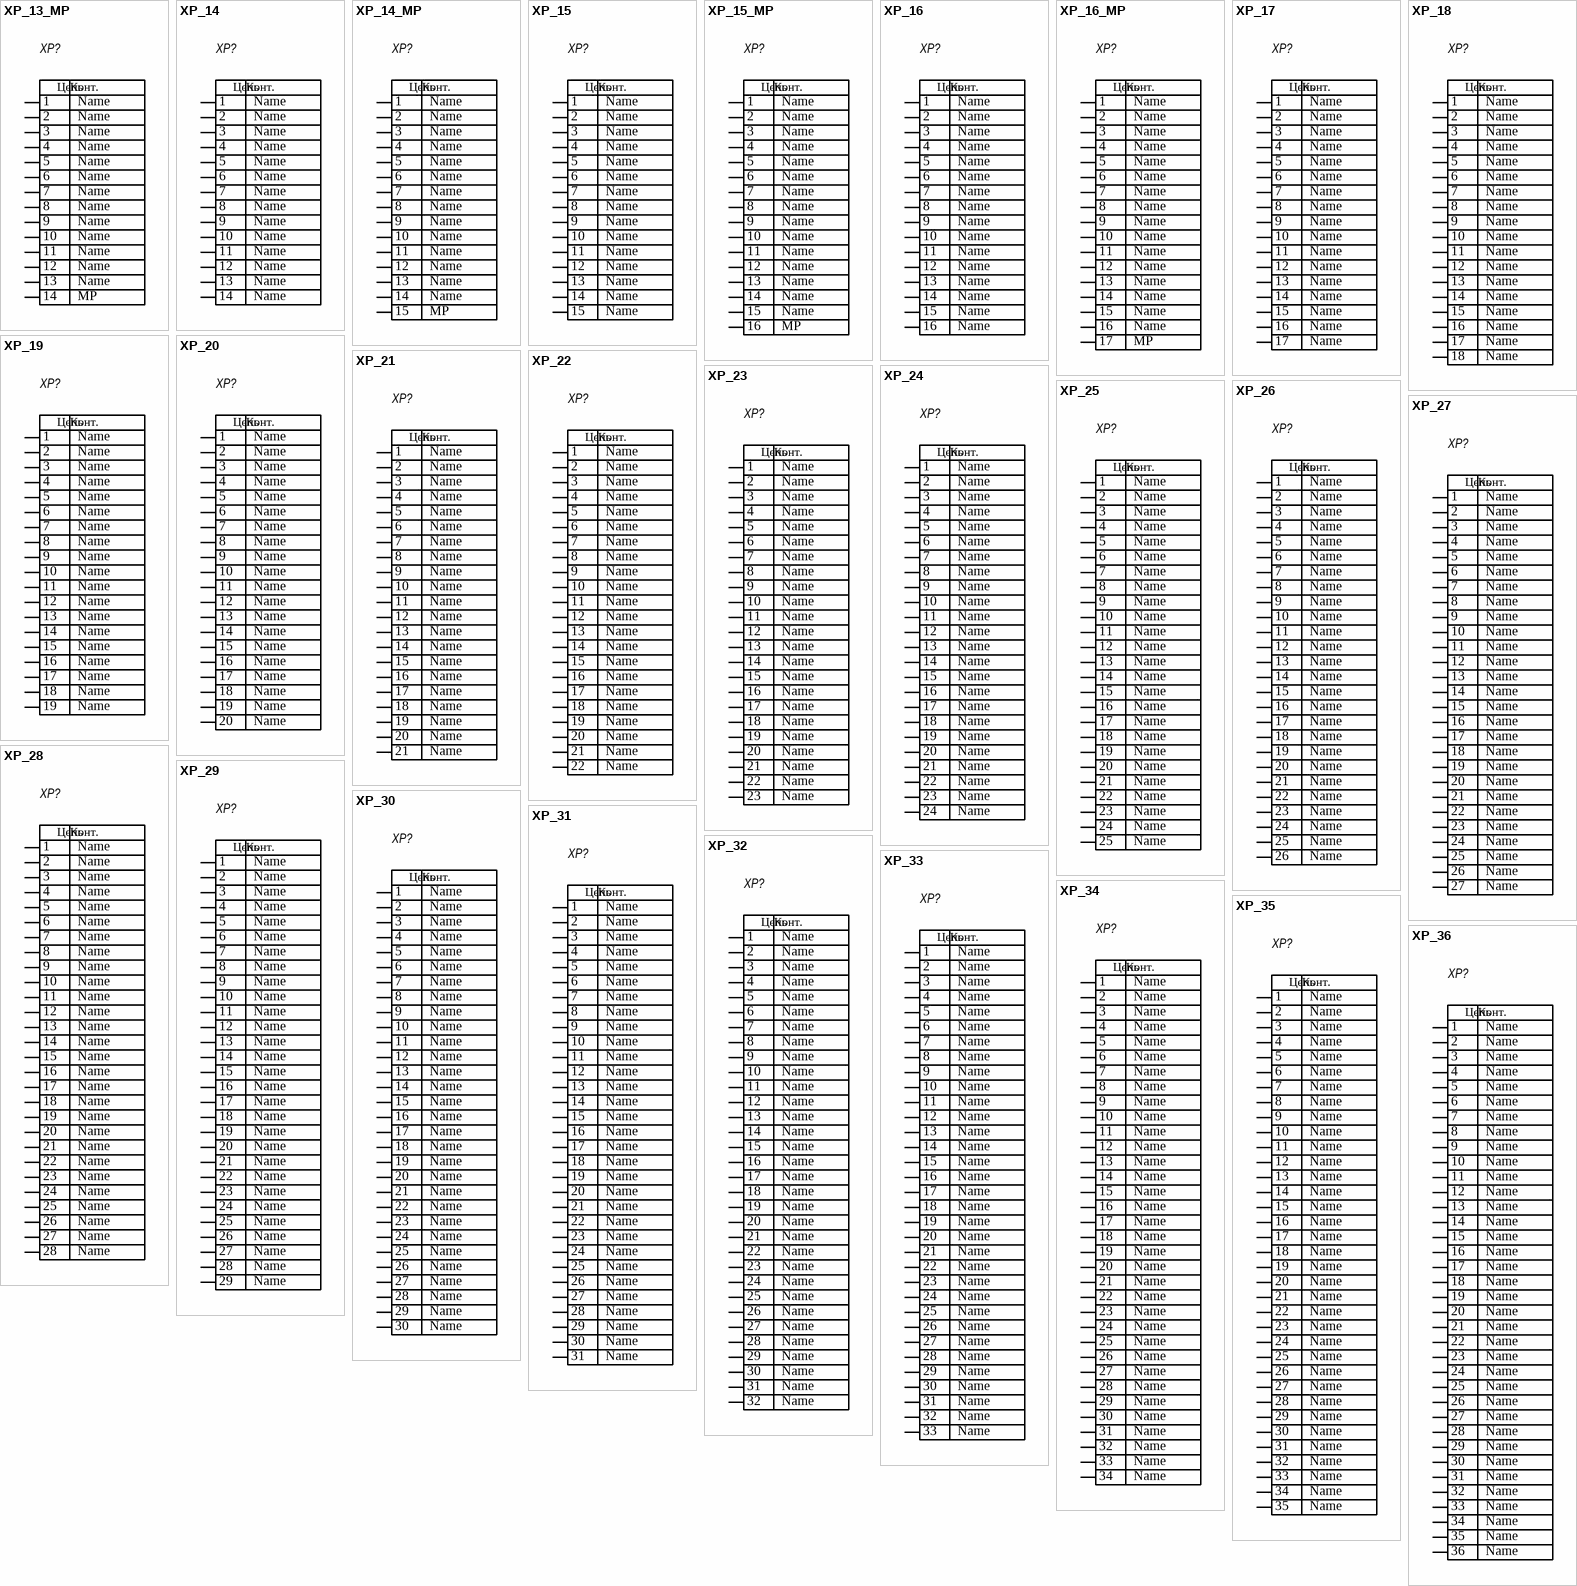
[diagram p2: symbols XP_13_MP to XP_36]

## XP_13_MP
designator XP?  Pin14_Name: MP  Pin13_Name: Name  (hidden comment: *)
13 signal contacts plus MP; plug connector; Value: *; Pin12_Name: Name; Pin11_Name: Name; Pin10_Name: Name; Pin9_Name: Name; Pin8_Name: Name; Pin7_Name: Name; Pin6_Name: Name; Pin5_Name: Name; Pin4_Name: Name; Pin3_Name: Name; Pin2_Name: Name; Pin1_Name: Name
pins: 1 Name, 2 Name, 3 Name, 4 Name, 5 Name, 6 Name, 7 Name, 8 Name, 9 Name, 10 Name, 11 Name, 12 Name, 13 Name, 14 MP
1 alternate drawing of the same symbol
text: Конт.; Цепь

## XP_14
designator XP?  Pin14_Name: Name  (hidden comment: *)
Generic 14-contact connector; DBUR table style; editable signal names; Value: *; Pin13_Name: Name; Pin12_Name: Name; Pin11_Name: Name; Pin10_Name: Name; Pin9_Name: Name; Pin8_Name: Name; Pin7_Name: Name; Pin6_Name: Name; Pin5_Name: Name; Pin4_Name: Name; Pin3_Name: Name; Pin2_Name: Name; Pin1_Name: Name
pins: 1 Name, 2 Name, 3 Name, 4 Name, 5 Name, 6 Name, 7 Name, 8 Name, 9 Name, 10 Name, 11 Name, 12 Name, 13 Name, 14 Name
1 alternate drawing of the same symbol
text: Конт.; Цепь

## XP_14_MP
designator XP?  Pin15_Name: MP  Pin14_Name: Name  (hidden comment: *)
14 signal contacts plus MP; plug connector; Value: *; Pin13_Name: Name; Pin12_Name: Name; Pin11_Name: Name; Pin10_Name: Name; Pin9_Name: Name; Pin8_Name: Name; Pin7_Name: Name; Pin6_Name: Name; Pin5_Name: Name; Pin4_Name: Name; Pin3_Name: Name; Pin2_Name: Name; Pin1_Name: Name
pins: 1 Name, 2 Name, 3 Name, 4 Name, 5 Name, 6 Name, 7 Name, 8 Name, 9 Name, 10 Name, 11 Name, 12 Name, 13 Name, 14 Name, 15 MP
1 alternate drawing of the same symbol
text: Конт.; Цепь

## XP_15
designator XP?  Pin15_Name: Name  (hidden comment: *)
Generic 15-contact connector; DBUR table style; editable signal names; Value: *; Pin14_Name: Name; Pin13_Name: Name; Pin12_Name: Name; Pin11_Name: Name; Pin10_Name: Name; Pin9_Name: Name; Pin8_Name: Name; Pin7_Name: Name; Pin6_Name: Name; Pin5_Name: Name; Pin4_Name: Name; Pin3_Name: Name; Pin2_Name: Name; Pin1_Name: Name
pins: 1 Name, 2 Name, 3 Name, 4 Name, 5 Name, 6 Name, 7 Name, 8 Name, 9 Name, 10 Name, 11 Name, 12 Name, 13 Name, 14 Name, 15 Name
1 alternate drawing of the same symbol
text: Конт.; Цепь

## XP_15_MP
designator XP?  Pin16_Name: MP  Pin15_Name: Name  (hidden comment: *)
15 signal contacts plus MP; plug connector; Value: *; Pin14_Name: Name; Pin13_Name: Name; Pin12_Name: Name; Pin11_Name: Name; Pin10_Name: Name; Pin9_Name: Name; Pin8_Name: Name; Pin7_Name: Name; Pin6_Name: Name; Pin5_Name: Name; Pin4_Name: Name; Pin3_Name: Name; Pin2_Name: Name; Pin1_Name: Name
pins: 1 Name, 2 Name, 3 Name, 4 Name, 5 Name, 6 Name, 7 Name, 8 Name, 9 Name, 10 Name, 11 Name, 12 Name, 13 Name, 14 Name, 15 Name, 16 MP
1 alternate drawing of the same symbol
text: Конт.; Цепь

## XP_16
designator XP?  Pin16_Name: Name  (hidden comment: *)
Generic 16-contact connector; DBUR table style; editable signal names; Value: *; Pin15_Name: Name; Pin14_Name: Name; Pin13_Name: Name; Pin12_Name: Name; Pin11_Name: Name; Pin10_Name: Name; Pin9_Name: Name; Pin8_Name: Name; Pin7_Name: Name; Pin6_Name: Name; Pin5_Name: Name; Pin4_Name: Name; Pin3_Name: Name; Pin2_Name: Name; Pin1_Name: Name
pins: 1 Name, 2 Name, 3 Name, 4 Name, 5 Name, 6 Name, 7 Name, 8 Name, 9 Name, 10 Name, 11 Name, 12 Name, 13 Name, 14 Name, 15 Name, 16 Name
1 alternate drawing of the same symbol
text: Конт.; Цепь

## XP_16_MP
designator XP?  Pin17_Name: MP  Pin16_Name: Name  (hidden comment: *)
16 signal contacts plus MP; plug connector; Value: *; Pin15_Name: Name; Pin14_Name: Name; Pin13_Name: Name; Pin12_Name: Name; Pin11_Name: Name; Pin10_Name: Name; Pin9_Name: Name; Pin8_Name: Name; Pin7_Name: Name; Pin6_Name: Name; Pin5_Name: Name; Pin4_Name: Name; Pin3_Name: Name; Pin2_Name: Name; Pin1_Name: Name
pins: 1 Name, 2 Name, 3 Name, 4 Name, 5 Name, 6 Name, 7 Name, 8 Name, 9 Name, 10 Name, 11 Name, 12 Name, 13 Name, 14 Name, 15 Name, 16 Name, 17 MP
1 alternate drawing of the same symbol
text: Конт.; Цепь

## XP_17
designator XP?  Pin17_Name: Name  (hidden comment: *)
Generic 17-contact connector; DBUR table style; editable signal names; Value: *; Pin16_Name: Name; Pin15_Name: Name; Pin14_Name: Name; Pin13_Name: Name; Pin12_Name: Name; Pin11_Name: Name; Pin10_Name: Name; Pin9_Name: Name; Pin8_Name: Name; Pin7_Name: Name; Pin6_Name: Name; Pin5_Name: Name; Pin4_Name: Name; Pin3_Name: Name; Pin2_Name: Name; Pin1_Name: Name
pins: 1 Name, 2 Name, 3 Name, 4 Name, 5 Name, 6 Name, 7 Name, 8 Name, 9 Name, 10 Name, 11 Name, 12 Name, 13 Name, 14 Name, 15 Name, 16 Name, 17 Name
1 alternate drawing of the same symbol
text: Конт.; Цепь

## XP_18
designator XP?  Pin18_Name: Name  (hidden comment: *)
Generic 18-contact connector; DBUR table style; editable signal names; Value: *; Pin17_Name: Name; Pin16_Name: Name; Pin15_Name: Name; Pin14_Name: Name; Pin13_Name: Name; Pin12_Name: Name; Pin11_Name: Name; Pin10_Name: Name; Pin9_Name: Name; Pin8_Name: Name; Pin7_Name: Name; Pin6_Name: Name; Pin5_Name: Name; Pin4_Name: Name; Pin3_Name: Name; Pin2_Name: Name; Pin1_Name: Name
pins: 1 Name, 2 Name, 3 Name, 4 Name, 5 Name, 6 Name, 7 Name, 8 Name, 9 Name, 10 Name, 11 Name, 12 Name, 13 Name, 14 Name, 15 Name, 16 Name, 17 Name, 18 Name
1 alternate drawing of the same symbol
text: Конт.; Цепь

## XP_19
designator XP?  Pin19_Name: Name  (hidden comment: *)
Generic 19-contact connector; DBUR table style; editable signal names; Value: *; Pin18_Name: Name; Pin17_Name: Name; Pin16_Name: Name; Pin15_Name: Name; Pin14_Name: Name; Pin13_Name: Name; Pin12_Name: Name; Pin11_Name: Name; Pin10_Name: Name; Pin9_Name: Name; Pin8_Name: Name; Pin7_Name: Name; Pin6_Name: Name; Pin5_Name: Name; Pin4_Name: Name; Pin3_Name: Name; Pin2_Name: Name; Pin1_Name: Name
pins: 1 Name, 2 Name, 3 Name, 4 Name, 5 Name, 6 Name, 7 Name, 8 Name, 9 Name, 10 Name, 11 Name, 12 Name, 13 Name, 14 Name, 15 Name, 16 Name, 17 Name, 18 Name, 19 Name
1 alternate drawing of the same symbol
text: Конт.; Цепь

## XP_20
designator XP?  Pin20_Name: Name  (hidden comment: *)
Generic 20-contact connector; DBUR table style; editable signal names; Value: *; Pin19_Name: Name; Pin18_Name: Name; Pin17_Name: Name; Pin16_Name: Name; Pin15_Name: Name; Pin14_Name: Name; Pin13_Name: Name; Pin12_Name: Name; Pin11_Name: Name; Pin10_Name: Name; Pin9_Name: Name; Pin8_Name: Name; Pin7_Name: Name; Pin6_Name: Name; Pin5_Name: Name; Pin4_Name: Name; Pin3_Name: Name; Pin2_Name: Name; Pin1_Name: Name
pins: 1 Name, 2 Name, 3 Name, 4 Name, 5 Name, 6 Name, 7 Name, 8 Name, 9 Name, 10 Name, 11 Name, 12 Name, 13 Name, 14 Name, 15 Name, 16 Name, 17 Name, 18 Name, 19 Name, 20 Name
1 alternate drawing of the same symbol
text: Конт.; Цепь

## XP_21
designator XP?  Pin21_Name: Name  (hidden comment: *)
Generic 21-contact connector; DBUR table style; editable signal names; Value: *; Pin20_Name: Name; Pin19_Name: Name; Pin18_Name: Name; Pin17_Name: Name; Pin16_Name: Name; Pin15_Name: Name; Pin14_Name: Name; Pin13_Name: Name; Pin12_Name: Name; Pin11_Name: Name; Pin10_Name: Name; Pin9_Name: Name; Pin8_Name: Name; Pin7_Name: Name; Pin6_Name: Name; Pin5_Name: Name; Pin4_Name: Name; Pin3_Name: Name; Pin2_Name: Name; Pin1_Name: Name
pins: 1 Name, 2 Name, 3 Name, 4 Name, 5 Name, 6 Name, 7 Name, 8 Name, 9 Name, 10 Name, 11 Name, 12 Name, 13 Name, 14 Name, 15 Name, 16 Name, 17 Name, 18 Name, 19 Name, 20 Name, 21 Name
1 alternate drawing of the same symbol
text: Конт.; Цепь

## XP_22
designator XP?  Pin22_Name: Name  (hidden comment: *)
Generic 22-contact connector; DBUR table style; editable signal names; Value: *; Pin21_Name: Name; Pin20_Name: Name; Pin19_Name: Name; Pin18_Name: Name; Pin17_Name: Name; Pin16_Name: Name; Pin15_Name: Name; Pin14_Name: Name; Pin13_Name: Name; Pin12_Name: Name; Pin11_Name: Name; Pin10_Name: Name; Pin9_Name: Name; Pin8_Name: Name; Pin7_Name: Name; Pin6_Name: Name; Pin5_Name: Name; Pin4_Name: Name; Pin3_Name: Name; Pin2_Name: Name; Pin1_Name: Name
pins: 1 Name, 2 Name, 3 Name, 4 Name, 5 Name, 6 Name, 7 Name, 8 Name, 9 Name, 10 Name, 11 Name, 12 Name, 13 Name, 14 Name, 15 Name, 16 Name, 17 Name, 18 Name, 19 Name, 20 Name, 21 Name, 22 Name
1 alternate drawing of the same symbol
text: Конт.; Цепь

## XP_23
designator XP?  Pin23_Name: Name  (hidden comment: *)
Generic 23-contact connector; DBUR table style; editable signal names; Value: *; Pin22_Name: Name; Pin21_Name: Name; Pin20_Name: Name; Pin19_Name: Name; Pin18_Name: Name; Pin17_Name: Name; Pin16_Name: Name; Pin15_Name: Name; Pin14_Name: Name; Pin13_Name: Name; Pin12_Name: Name; Pin11_Name: Name; Pin10_Name: Name; Pin9_Name: Name; Pin8_Name: Name; Pin7_Name: Name; Pin6_Name: Name; Pin5_Name: Name; Pin4_Name: Name; Pin3_Name: Name; Pin2_Name: Name; Pin1_Name: Name
pins: 1 Name, 2 Name, 3 Name, 4 Name, 5 Name, 6 Name, 7 Name, 8 Name, 9 Name, 10 Name, 11 Name, 12 Name, 13 Name, 14 Name, 15 Name, 16 Name, 17 Name, 18 Name, 19 Name, 20 Name, 21 Name, 22 Name, 23 Name
1 alternate drawing of the same symbol
text: Конт.; Цепь

## XP_24
designator XP?  Pin24_Name: Name  (hidden comment: *)
Generic 24-contact connector; DBUR table style; editable signal names; Value: *; Pin23_Name: Name; Pin22_Name: Name; Pin21_Name: Name; Pin20_Name: Name; Pin19_Name: Name; Pin18_Name: Name; Pin17_Name: Name; Pin16_Name: Name; Pin15_Name: Name; Pin14_Name: Name; Pin13_Name: Name; Pin12_Name: Name; Pin11_Name: Name; Pin10_Name: Name; Pin9_Name: Name; Pin8_Name: Name; Pin7_Name: Name; Pin6_Name: Name; Pin5_Name: Name; Pin4_Name: Name; Pin3_Name: Name; Pin2_Name: Name; Pin1_Name: Name
pins: 1 Name, 2 Name, 3 Name, 4 Name, 5 Name, 6 Name, 7 Name, 8 Name, 9 Name, 10 Name, 11 Name, 12 Name, 13 Name, 14 Name, 15 Name, 16 Name, 17 Name, 18 Name, 19 Name, 20 Name, 21 Name, 22 Name, 23 Name, 24 Name
1 alternate drawing of the same symbol
text: Конт.; Цепь

## XP_25
designator XP?  Pin25_Name: Name  (hidden comment: *)
Generic 25-contact connector; DBUR table style; editable signal names; Value: *; Pin24_Name: Name; Pin23_Name: Name; Pin22_Name: Name; Pin21_Name: Name; Pin20_Name: Name; Pin19_Name: Name; Pin18_Name: Name; Pin17_Name: Name; Pin16_Name: Name; Pin15_Name: Name; Pin14_Name: Name; Pin13_Name: Name; Pin12_Name: Name; Pin11_Name: Name; Pin10_Name: Name; Pin9_Name: Name; Pin8_Name: Name; Pin7_Name: Name; Pin6_Name: Name; Pin5_Name: Name; Pin4_Name: Name; Pin3_Name: Name; Pin2_Name: Name; Pin1_Name: Name
pins: 1 Name, 2 Name, 3 Name, 4 Name, 5 Name, 6 Name, 7 Name, 8 Name, 9 Name, 10 Name, 11 Name, 12 Name, 13 Name, 14 Name, 15 Name, 16 Name, 17 Name, 18 Name, 19 Name, 20 Name, 21 Name, 22 Name, 23 Name, 24 Name, 25 Name
1 alternate drawing of the same symbol
text: Конт.; Цепь

## XP_26
designator XP?  Pin26_Name: Name  (hidden comment: *)
Generic 26-contact connector; DBUR table style; editable signal names; Value: *; Pin25_Name: Name; Pin24_Name: Name; Pin23_Name: Name; Pin22_Name: Name; Pin21_Name: Name; Pin20_Name: Name; Pin19_Name: Name; Pin18_Name: Name; Pin17_Name: Name; Pin16_Name: Name; Pin15_Name: Name; Pin14_Name: Name; Pin13_Name: Name; Pin12_Name: Name; Pin11_Name: Name; Pin10_Name: Name; Pin9_Name: Name; Pin8_Name: Name; Pin7_Name: Name; Pin6_Name: Name; Pin5_Name: Name; Pin4_Name: Name; Pin3_Name: Name; Pin2_Name: Name; Pin1_Name: Name
pins: 1 Name, 2 Name, 3 Name, 4 Name, 5 Name, 6 Name, 7 Name, 8 Name, 9 Name, 10 Name, 11 Name, 12 Name, 13 Name, 14 Name, 15 Name, 16 Name, 17 Name, 18 Name, 19 Name, 20 Name, 21 Name, 22 Name, 23 Name, 24 Name, 25 Name, 26 Name
1 alternate drawing of the same symbol
text: Конт.; Цепь